# EAGLE library part E73-2G4M08S1F (library astra)
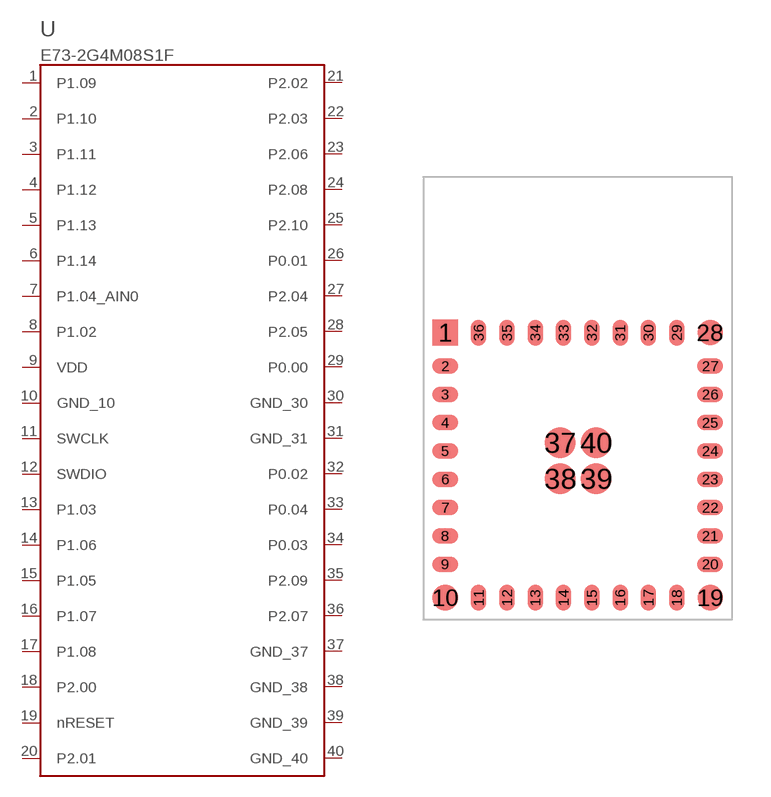
[diagram p7: symbol with the pads of EBYTE_08S1F_LGA40; footprint EBYTE_08S1F_LGA40]

Designator prefix U

## E73-2G4M08S1F  [EBYTE_08S1F_LGA40]
1  P1.09
2  P1.10
3  P1.11
4  P1.12
5  P1.13
6  P1.14
7  P1.04_AIN0
8  P1.02
9  VDD  pwr
10  GND_10  pwr
11  SWCLK  in
12  SWDIO
13  P1.03
14  P1.06
15  P1.05
16  P1.07
17  P1.08
18  P2.00
19  nRESET  in
20  P2.01
21  P2.02
22  P2.03
23  P2.06
24  P2.08
25  P2.10
26  P0.01
27  P2.04
28  P2.05
29  P0.00
30  GND_30  pwr
31  GND_31  pwr
32  P0.02
33  P0.04
34  P0.03
35  P2.09
36  P2.07
37  GND_37  pwr
38  GND_38  pwr
39  GND_39  pwr
40  GND_40  pwr

## Footprint EBYTE_08S1F_LGA40 (pad centres in mm)
Ebyte orderable drawing §3.1 + original Altium E73-2G4M08S1F.PcbLib. Peripheral land centers and all land sizes use manufacturer CAD. Central lands 37–40 indexed from dimensioned package drawing; see verification/radio/pad-verification.json.
smd 1 x 1: 1 -5.15,2.55; 10 -5.15,-7.75; 19 5.15,-7.75; 28 5.15,2.55
smd 1 x 0.6: 2 -5.15,1.25; 3 -5.15,0.15; 4 -5.15,-0.95; 5 -5.15,-2.05; 6 -5.15,-3.15; 7 -5.15,-4.25; 8 -5.15,-5.35; 9 -5.15,-6.45; 20 5.15,-6.45; 21 5.15,-5.35; 22 5.15,-4.25; 23 5.15,-3.15; 24 5.15,-2.05; 25 5.15,-0.95; 26 5.15,0.15; 27 5.15,1.25
smd 0.6 x 1: 11 -3.85,-7.75; 12 -2.75,-7.75; 13 -1.65,-7.75; 14 -0.55,-7.75; 15 0.55,-7.75; 16 1.65,-7.75; 17 2.75,-7.75; 18 3.85,-7.75; 29 3.85,2.55; 30 2.75,2.55; 31 1.65,2.55; 32 0.55,2.55; 33 -0.55,2.55; 34 -1.65,2.55; 35 -2.75,2.55; 36 -3.85,2.55
smd 1.2 x 1.2: 37 -0.675,-1.725; 38 -0.675,-3.125; 39 0.725,-3.125; 40 0.725,-1.725